# Altium footprint library Peinetas.PcbLib: 36 footprints (part 2 of 3)
Each footprint in its own frame and in the unit in brackets; x right, y up, seen from the top. Pads: shape width x height; smd on the part's side, far side on the other; paste and mask are expansions set on the pad; w line width, h text height; cw(c..) or ccw(c..) is an arc to the next point about the centre after c.
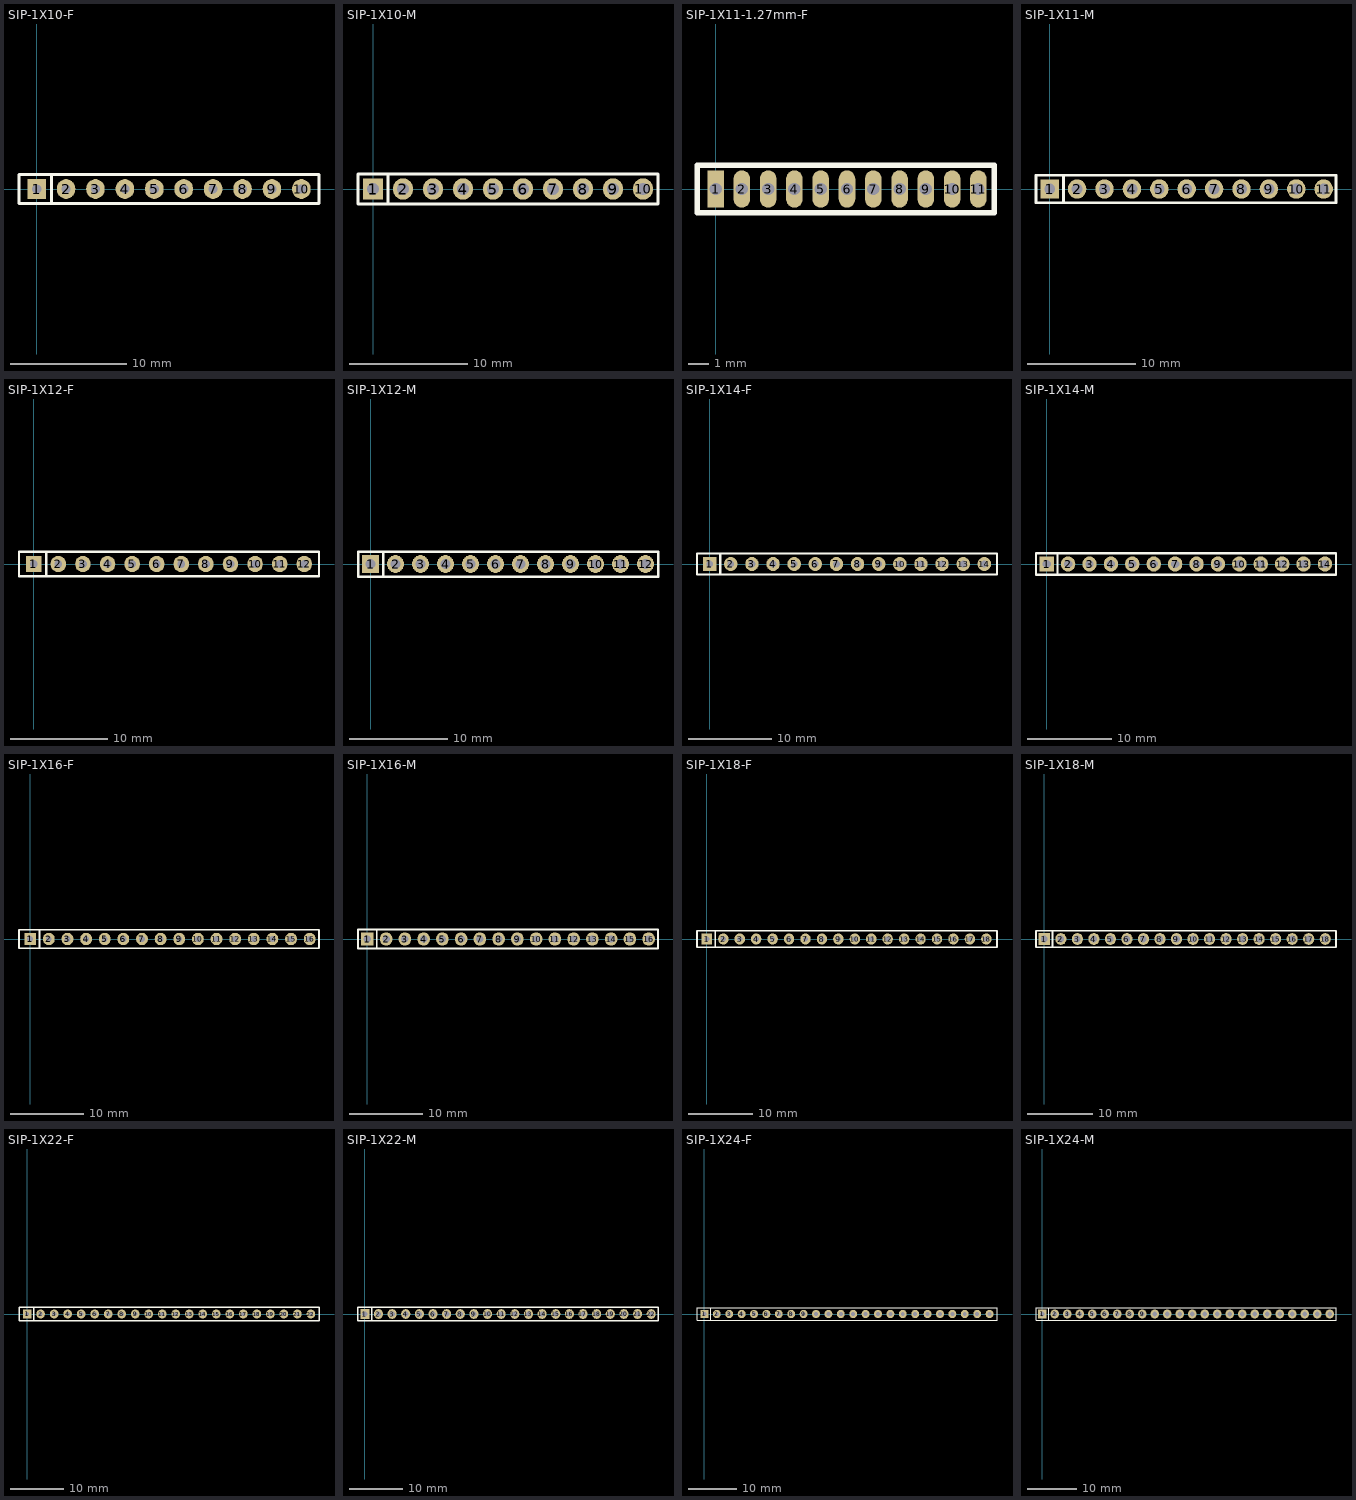
[diagram p1: the footprints below, top view; thin cyan lines are the x and y axes]

## SIP-1X10-F [mm]
pads (10):
  rect 1.6x1.7 hole 0.8: 1(0,0)
  oval 1.6x1.7 hole 0.8: 2(2.54,0) 3(5.08,0) 4(7.62,0) 5(10.16,0) 6(12.7,0) 7(15.24,0) 8(17.78,0) 9(20.32,0) 10(22.86,0)
Top Overlay:
  lines w0.254: 1.27,-1.27 1.27,1.27 ; -1.524,-1.27 -1.524,1.27 24.384,1.27 24.384,-1.27 -1.524,-1.27
3D body "hdrf-1x10t_2.54_26x3.step": height 8.5, standoff -3.2, extent -1.52,-1.25 24.38,1.25

## SIP-1X10-M [mm]
pads (10):
  rect 1.7x1.8 hole 1: 1(0,0)
  oval 1.7x1.8 hole 1: 2(2.54,0) 3(5.08,0) 4(7.62,0) 5(10.16,0) 6(12.7,0) 7(15.24,0) 8(17.78,0) 9(20.32,0) 10(22.86,0)
Top Overlay:
  lines w0.254: 1.27,-1.27 1.27,1.27 ; -1.27,-1.27 24.13,-1.27 24.13,1.27 -1.27,1.27 -1.27,-1.27
3D body "hdr-1x10t_2.54_25x2.step": height 10.04, standoff -2.8, extent -1.12,-1.16 23.98,1.16

## SIP-1X11-1.27mm-F [mm]
pads (11):
  rect 0.8x1.8 hole 0.6: 1(0,0)
  oval 0.8x1.8 hole 0.6: 2(1.27,0) 3(2.54,0) 4(3.81,0) 5(5.08,0) 6(6.35,0) 7(7.62,0) 8(8.89,0) 9(10.16,0) 10(11.43,0) 11(12.7,0)
Top Overlay:
  lines w0.254: -0.889,-1.143 -0.889,1.143 13.462,1.143 13.462,-1.143 -0.889,-1.143
3D body "hdrf-1x11t_1.27_14x2.step": height 4.5, standoff -3, extent -0.835,-1.1 13.535,1.1

## SIP-1X11-M [mm]
pads (11):
  rect 1.7x1.8 hole 1: 1(0,0)
  oval 1.7x1.8 hole 1: 2(2.54,0) 3(5.08,0) 4(7.62,0) 5(10.16,0) 6(12.7,0) 7(15.24,0) 8(17.78,0) 9(20.32,0) 10(22.86,0) 11(25.4,0)
Top Overlay:
  lines w0.254: 1.27,-1.27 1.27,1.27 ; -1.27,-1.27 26.543,-1.27 26.543,1.27 -1.27,1.27 -1.27,-1.27
3D body "hdr-1x11t_2.54_28x2.step": height 10.04, standoff -2.8, extent -1.143,-1.16 26.497,1.16

## SIP-1X12-F [mm]
pads (12):
  rect 1.6x1.7 hole 0.8: 1(0,0)
  oval 1.6x1.7 hole 0.8: 2(2.54,0) 3(5.08,0) 4(7.62,0) 5(10.16,0) 6(12.7,0) 7(15.24,0) 8(17.78,0) 9(20.32,0) 10(22.86,0) 11(25.4,0) 12(27.94,0)
Top Overlay:
  lines w0.254: 1.27,-1.27 1.27,1.27 ; -1.524,-1.27 29.464,-1.27 29.464,1.27 -1.524,1.27 -1.524,-1.27
3D body "hdrf-1x12t_2.54_31x3.step": height 8.5, standoff -3.2, extent -1.524,-1.23 29.456,1.27

## SIP-1X12-M [mm]
pads (12):
  rect 1.7x1.8 hole 1: 1(0,0)
  oval 1.7x1.8 hole 1: 2(2.54,0) 3(5.08,0) 4(7.62,0) 5(10.16,0) 6(12.7,0) 7(15.24,0) 8(17.78,0) 9(20.32,0) 10(22.86,0) 11(25.4,0) 12(27.94,0)
Top Overlay:
  lines w0.254: 1.27,-1.27 1.27,1.27 ; -1.27,-1.27 -1.27,1.27 29.21,1.27 29.21,-1.27 -1.27,-1.27
3D body "hdr-1x12t_2.54_30x2.step": height 10.04, standoff -2.8, extent -1.12,-1.16 29.06,1.16

## SIP-1X14-F [mm]
pads (14):
  rect 1.6x1.7 hole 0.8: 1(0,0)
  oval 1.6x1.7 hole 0.8: 2(2.54,0) 3(5.08,0) 4(7.62,0) 5(10.16,0) 6(12.7,0) 7(15.24,0) 8(17.78,0) 9(20.32,0) 10(22.86,0) 11(25.4,0) 12(27.94,0) 13(30.48,0) 14(33.02,0)
Top Overlay:
  lines w0.254: 1.27,-1.27 1.27,1.27 ; -1.524,-1.27 -1.524,1.27 34.544,1.27 34.544,-1.27 -1.524,-1.27
3D body "hdrf-1x14t_2.54_36x3.step": height 8.5, standoff -3.2, extent -1.52,-1.25 34.54,1.25

## SIP-1X14-M [mm]
pads (14):
  rect 1.7x1.8 hole 1: 1(0,0)
  oval 1.7x1.8 hole 1: 2(2.54,0) 3(5.08,0) 4(7.62,0) 5(10.16,0) 6(12.7,0) 7(15.24,0) 8(17.78,0) 9(20.32,0) 10(22.86,0) 11(25.4,0) 12(27.94,0) 13(30.48,0) 14(33.02,0)
Top Overlay:
  lines w0.254: 1.27,-1.27 1.27,1.27 ; -1.27,-1.27 -1.27,1.27 34.33,1.27 34.33,-1.27 -1.27,-1.27
3D body "hdr-1x14t_2.54_35x2.step": height 10.04, standoff -2.8, extent -1.12,-1.177 34.14,1.143

## SIP-1X16-F [mm]
pads (16):
  rect 1.6x1.7 hole 0.8: 1(0,0)
  oval 1.6x1.7 hole 0.8: 2(2.54,0) 3(5.08,0) 4(7.62,0) 5(10.16,0) 6(12.7,0) 7(15.24,0) 8(17.78,0) 9(20.32,0) 10(22.86,0) 11(25.4,0) 12(27.94,0) 13(30.48,0) 14(33.02,0) 15(35.56,0) 16(38.1,0)
Top Overlay:
  lines w0.254: 1.27,-1.27 1.27,1.27 ; -1.524,-1.27 39.37,-1.27 39.37,1.27 -1.524,1.27 -1.524,-1.27
3D body "hdrf-1x16t_2.54_41x3.step": height 8.5, standoff -3.2, extent -1.52,-1.25 39.62,1.25

## SIP-1X16-M [mm]
pads (16):
  rect 1.7x1.8 hole 1: 1(0,0)
  oval 1.7x1.8 hole 1: 2(2.54,0) 3(5.08,0) 4(7.62,0) 5(10.16,0) 6(12.7,0) 7(15.24,0) 8(17.78,0) 9(20.32,0) 10(22.86,0) 11(25.4,0) 12(27.94,0) 13(30.48,0) 14(33.02,0) 15(35.56,0) 16(38.1,0)
Top Overlay:
  lines w0.254: 1.27,-1.27 1.27,1.27 ; -1.27,-1.27 -1.27,1.27 39.37,1.27 39.37,-1.27 -1.27,-1.27
3D body "hdr-1x16t_2.54_40x2.step": height 10.04, standoff -2.8, extent -1.12,-1.16 39.22,1.16

## SIP-1X18-F [mm]
pads (18):
  rect 1.6x1.7 hole 0.8: 1(0,0)
  oval 1.6x1.7 hole 0.8: 2(2.54,0) 3(5.08,0) 4(7.62,0) 5(10.16,0) 6(12.7,0) 7(15.24,0) 8(17.78,0) 9(20.32,0) 10(22.86,0) 11(25.4,0) 12(27.94,0) 13(30.48,0) 14(33.02,0) 15(35.56,0) 16(38.1,0) 17(40.64,0) 18(43.18,0)
Top Overlay:
  lines w0.254: 1.27,-1.27 1.27,1.27 ; -1.524,-1.27 44.83,-1.27 44.83,1.27 -1.524,1.27 -1.524,-1.27
3D body "hdrf-1x18t_2.54_46x3.step": height 8.5, standoff -3.2, extent -1.52,-1.25 44.7,1.25

## SIP-1X18-M [mm]
pads (18):
  rect 1.7x1.8 hole 1: 1(0,0)
  oval 1.7x1.8 hole 1: 2(2.54,0) 3(5.08,0) 4(7.62,0) 5(10.16,0) 6(12.7,0) 7(15.24,0) 8(17.78,0) 9(20.32,0) 10(22.86,0) 11(25.4,0) 12(27.94,0) 13(30.48,0) 14(33.02,0) 15(35.56,0) 16(38.1,0) 17(40.64,0) 18(43.18,0)
Top Overlay:
  lines w0.254: 1.27,-1.27 1.27,1.27 ; -1.27,-1.27 -1.27,1.27 44.83,1.27 44.83,-1.27 -1.27,-1.27
3D body "hdr-1x18t_2.54_45x2.step": height 10.04, standoff -2.8, extent -1.12,-1.16 44.3,1.16

## SIP-1X22-F [mm]
pads (22):
  rect 1.6x1.7 hole 0.8: 1(0,0)
  oval 1.6x1.7 hole 0.8: 2(2.54,0) 3(5.08,0) 4(7.62,0) 5(10.16,0) 6(12.7,0) 7(15.24,0) 8(17.78,0) 9(20.32,0) 10(22.86,0) 11(25.4,0) 12(27.94,0) 13(30.48,0) 14(33.02,0) 15(35.56,0) 16(38.1,0) 17(40.64,0) 18(43.18,0) 19(45.72,0) 20(48.26,0) 21(50.8,0) 22(53.34,0)
Top Overlay:
  lines w0.254: 1.27,-1.27 1.27,1.27 ; -1.524,-1.27 54.864,-1.27 54.864,1.27 -1.524,1.27 -1.524,-1.27
3D body "hdrf-1x22t_2.54_56x3.step": height 8.5, standoff -3.2, extent -1.52,-1.25 54.86,1.25

## SIP-1X22-M [mm]
pads (22):
  rect 1.7x1.8 hole 1: 1(0,0)
  oval 1.7x1.8 hole 1: 2(2.54,0) 3(5.08,0) 4(7.62,0) 5(10.16,0) 6(12.7,0) 7(15.24,0) 8(17.78,0) 9(20.32,0) 10(22.86,0) 11(25.4,0) 12(27.94,0) 13(30.48,0) 14(33.02,0) 15(35.56,0) 16(38.1,0) 17(40.64,0) 18(43.18,0) 19(45.72,0) 20(48.26,0) 21(50.8,0) 22(53.34,0)
Top Overlay:
  lines w0.254: 1.27,-1.27 1.27,1.27 ; -1.27,-1.27 54.61,-1.27 54.61,1.27 -1.27,1.27 -1.27,-1.27
3D body "hdr-1x22t_2.54_56x2.step": height 10.04, standoff -2.8, extent -1.12,-1.16 54.46,1.16

## SIP-1X24-F [mm]
pads (24):
  rect 1.6x1.7 hole 0.8: 1(0,0)
  oval 1.6x1.7 hole 0.8: 2(2.54,0) 3(5.08,0) 4(7.62,0) 5(10.16,0) 6(12.7,0) 7(15.24,0) 8(17.78,0) 9(20.32,0) 10(22.86,0) 11(25.4,0) 12(27.94,0) 13(30.48,0) 14(33.02,0) 15(35.56,0) 16(38.1,0) 17(40.64,0) 18(43.18,0) 19(45.72,0) 20(48.26,0) 21(50.8,0) 22(53.34,0) 23(55.88,0) 24(58.42,0)
Top Overlay:
  lines w0.254: 1.27,-1.27 1.27,1.27 ; -1.524,-1.27 -1.524,1.27 59.944,1.27 59.944,-1.27 -1.524,-1.27
3D body "hdrf-1x24t_2.54_61x3.step": height 8.5, standoff -3.2, extent -1.52,-1.25 59.94,1.25

## SIP-1X24-M [mm]
pads (24):
  rect 1.7x1.8 hole 1: 1(0,0)
  oval 1.7x1.8 hole 1: 2(2.54,0) 3(5.08,0) 4(7.62,0) 5(10.16,0) 6(12.7,0) 7(15.24,0) 8(17.78,0) 9(20.32,0) 10(22.86,0) 11(25.4,0) 12(27.94,0) 13(30.48,0) 14(33.02,0) 15(35.56,0) 16(38.1,0) 17(40.64,0) 18(43.18,0) 19(45.72,0) 20(48.26,0) 21(50.8,0) 22(53.34,0) 23(55.88,0) 24(58.42,0)
Top Overlay:
  lines w0.254: 1.27,-1.27 1.27,1.27 ; -1.27,-1.27 59.69,-1.27 59.69,1.27 -1.27,1.27 -1.27,-1.27
3D body "hdr-1x24t_2.54_61x2.step": height 10.04, standoff -2.8, extent -1.12,-1.16 59.54,1.16